# Altium footprint library PCB1.PcbLib: 34 footprints (part 1 of 3)
Each footprint in its own frame and in the unit in brackets; x right, y up, seen from the top. Pads: shape width x height; smd on the part's side, far side on the other; paste and mask are expansions set on the pad; w line width, h text height; cw(c..) or ccw(c..) is an arc to the next point about the centre after c.
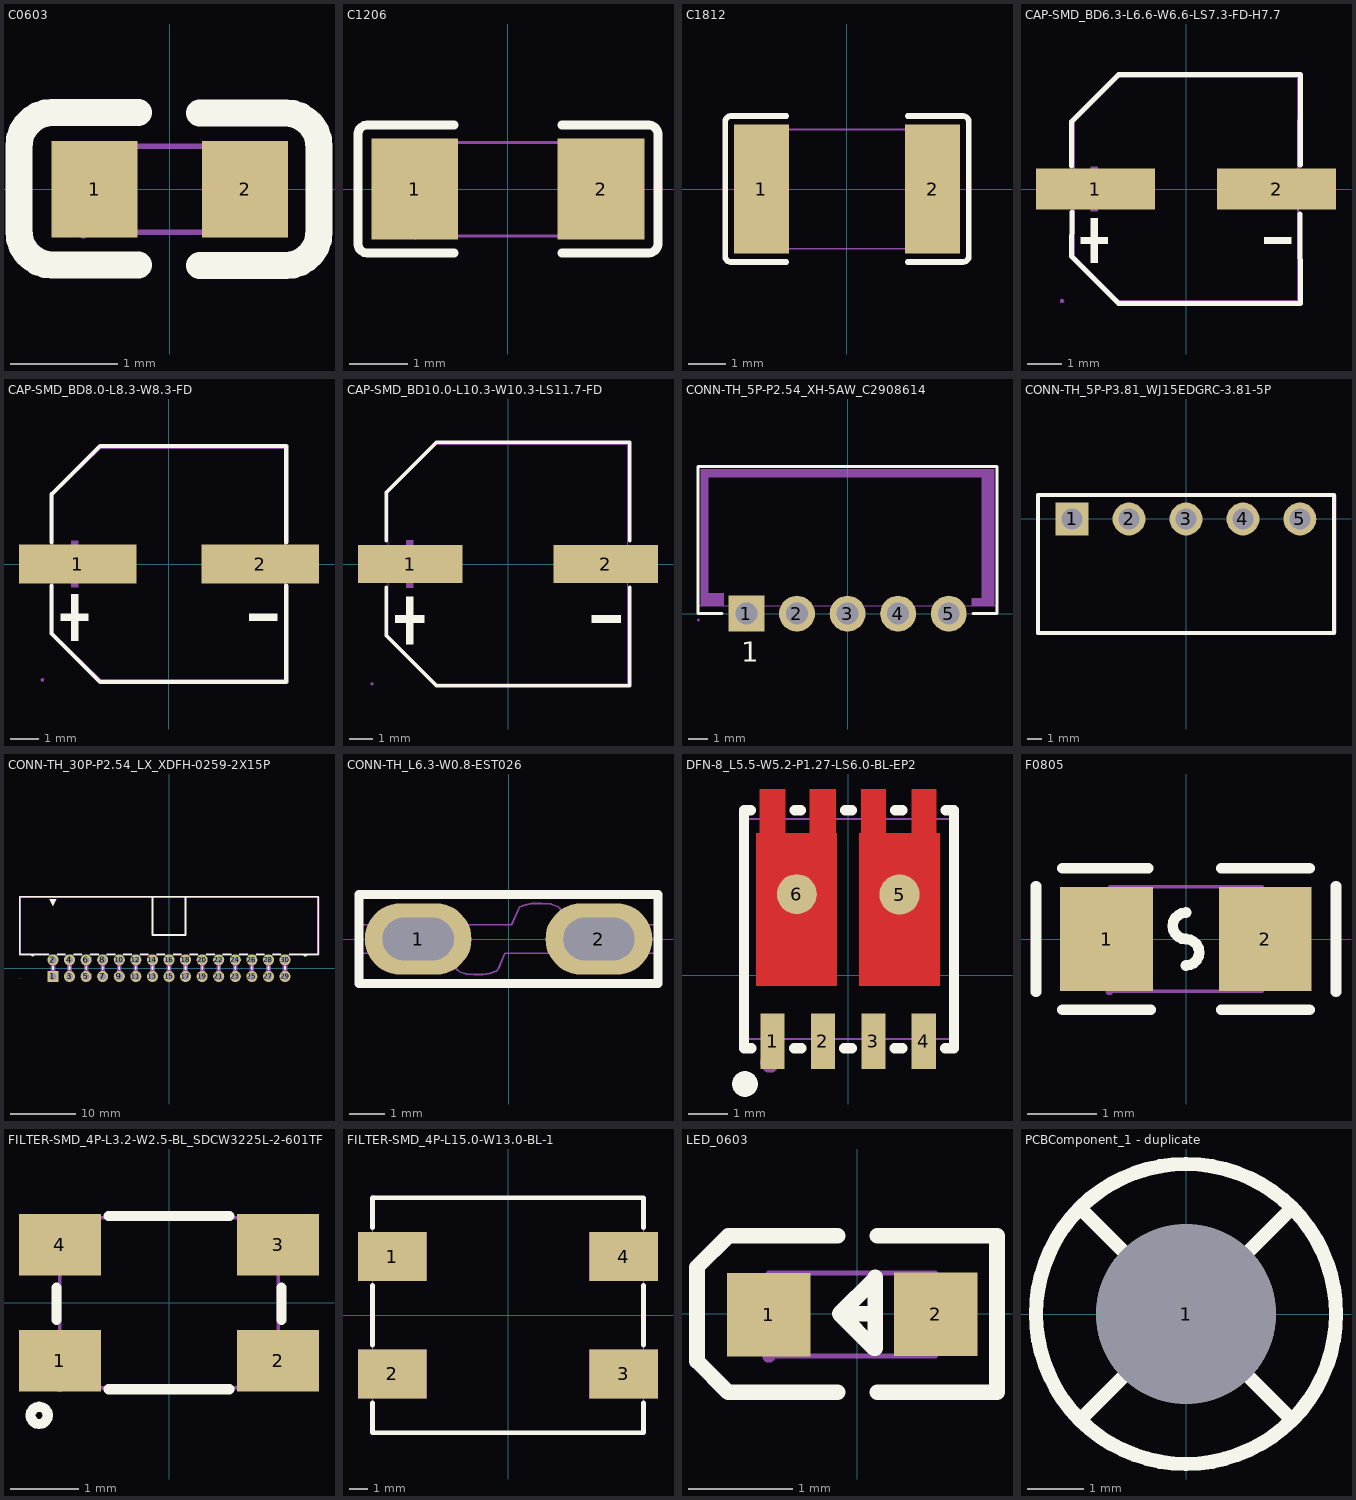
[diagram p0: the footprints below, top view; thin cyan lines are the x and y axes]

## C0603 [mil]
pads (2):
  rect 31.5x35.4 smd: 1(-27.6,0) 2(27.6,0)
Top Overlay:
  lines w10: -11.6,-27.7 -43.1,-27.7 -45.8,-27.4 -48.4,-26.5 -50.7,-25 -52.7,-23.1 -54.1,-20.8 -55,-18.2 -55.3,-15.5 -55.3,16 -55,18.7 -54.1,21.3 -52.7,23.6 -50.7,25.6 -48.4,27 -45.8,27.9 -43.1,28.2 -11.6,28.2 ; 11,-27.9 42.5,-27.9 45.2,-27.6 47.8,-26.7 50.1,-25.2 52.1,-23.3 53.5,-21 54.4,-18.4 54.7,-15.7 54.7,15.8 54.4,18.5 53.5,21.1 52.1,23.4 50.1,25.3 47.8,26.8 45.2,27.7 42.5,28 11,28
Mechanical 7:
  lines w2: -31.5,-15.7 -31.5,15.8 31.5,15.8 31.5,-15.7 -31.5,-15.7
Mechanical 8:
  region: -29.1,-15.7 -29.5,-17 -30.5,-17.8 -31.8,-18 -33,-17.5 -33.8,-16.4 -33.8,-15 -33,-13.9 -31.8,-13.4 -30.5,-13.6 -29.5,-14.4
Mechanical 9:
  region: -31.5,-15.7 -31.5,15.8 -19.7,15.8 -19.7,-15.7
  region: 31.5,-15.7 31.5,15.8 19.7,15.8 19.7,-15.7

## C1206 [mil]
pads (2):
  rect 58.5x68 smd paste-3937 mask+2: 1(-62.7,0) 2(62.7,0)
Top Overlay:
  lines w6: -36.4,-43 -94.9,-43 -96.8,-42.7 -98.4,-41.8 -99.8,-40.5 -100.6,-38.8 -100.9,-37 -100.9,37.1 -100.6,38.9 -99.8,40.6 -98.4,41.9 -96.8,42.8 -94.9,43.1 -36.4,43.1 ; 36.5,-43 95,-43 96.8,-42.7 98.5,-41.8 99.8,-40.5 100.7,-38.8 101,-37 101,37.1 100.7,38.9 99.8,40.6 98.5,41.9 96.8,42.8 95,43.1 36.5,43.1
Top Paste:
  region: -33.4,-30 -33.4,-15.5 -37.4,-11.5 -49.4,-11.5 -53.3,-7.6 -53.3,7.7 -49.4,11.6 -37.4,11.6 -33.4,15.5 -33.4,30.1 -37.4,34.1 -88,34.1 -91.9,30.1 -91.9,-30 -88,-34 -37.4,-34
  region: 33.5,-30 33.5,-15.5 37.4,-11.5 49.4,-11.5 53.4,-7.6 53.4,7.7 49.4,11.6 37.4,11.6 33.5,15.5 33.5,30.1 37.4,34.1 88,34.1 92,30.1 92,-30 88,-34 37.4,-34
Mechanical 7:
  lines w2: -63,-31.5 63,-31.5 63,31.5 -63,31.5 -63,-31.5
Mechanical 8:
  region: -60.6,-31.5 -61,-32.7 -62,-33.6 -63.3,-33.8 -64.5,-33.2 -65.2,-32.1 -65.2,-30.8 -64.5,-29.7 -63.3,-29.1 -62,-29.3 -61,-30.2
Mechanical 9:
  region: 63,-31.5 63,31.5 43.3,31.5 43.3,-31.5
  region: -63,-31.5 -63,31.5 -43.3,31.5 -43.3,-31.5

## C1812 [mil]
pads (2):
  rect 58.5x136.1 smd paste-3937 mask+2: 1(-90.2,0) 2(90.3,0)
Top Overlay:
  lines w6: -64,-77 -122.5,-77 -124.3,-76.7 -126,-75.9 -127.3,-74.5 -128.2,-72.9 -128.5,-71 -128.5,71.1 -128.2,72.9 -127.3,74.6 -126,75.9 -124.3,76.8 -122.5,77.1 -64,77.1 ; 64,-77 122.5,-77 124.4,-76.7 126,-75.9 127.4,-74.5 128.2,-72.9 128.5,-71 128.5,71.1 128.2,72.9 127.4,74.6 126,75.9 124.4,76.8 122.5,77.1 64,77.1
Top Paste:
  region: -61,-64.1 -61,-27 -64.9,-23.1 -76.9,-23.1 -80.9,-19.2 -80.9,19.2 -76.9,23.2 -64.9,23.2 -61,27.1 -61,64.1 -64.9,68.1 -115.5,68.1 -119.5,64.1 -119.5,-64.1 -115.5,-68 -64.9,-68
  region: 61,-64.1 61,-27 65,-23.1 77,-23.1 80.9,-19.2 80.9,19.2 77,23.2 65,23.2 61,27.1 61,64.1 65,68.1 115.6,68.1 119.5,64.1 119.5,-64.1 115.6,-68 65,-68
Mechanical 7:
  lines w2: -90.5,-63 90.6,-63 90.6,63 -90.5,63 -90.5,-63
Mechanical 8:
  region: -88.2,-63 -88.5,-64.2 -89.5,-65.1 -90.9,-65.3 -92.1,-64.8 -92.8,-63.6 -92.8,-62.3 -92.1,-61.2 -90.9,-60.6 -89.5,-60.8 -88.5,-61.7
Mechanical 9:
  region: 90.6,-63 90.6,63 70.9,63 70.9,-63
  region: -90.5,-63 -90.5,63 -70.8,63 -70.8,-63

## CAP-SMD_BD6.3-L6.6-W6.6-LS7.3-FD-H7.7 [mil]
pads (2):
  rect 137.8x47.2 smd: 1(-105.2,0) 2(105.1,0)
Top Overlay:
  region: -110.5,-33.7 -110.5,-85.7 -102.7,-85.7 -102.7,-33.7
  region: -122.2,-55.8 -122.2,-63.6 -91,-63.6 -91,-55.8
  region: 122.1,-55.8 122.1,-63.6 90.9,-63.6 90.9,-55.8
  lines w6: -133,27 -133,78 -78,133 132.9,133 132.6,27.9 ; -132.4,-27 -133,-78 -78.1,-132.9 132.9,-132.9 132.1,-29.1
Mechanical 6:
  region: -110.5,26 -110.5,-25.9 -102.7,-25.9 -102.7,26
  region: -122.2,3.9 -122.2,-3.9 -91,-3.9 -91,3.9
  region: 122.1,3.9 122.1,-3.9 90.9,-3.9 90.9,3.9
Mechanical 7:
  lines w2: -130,-77.9 -130,78 -78,130 129.9,130 129.9,-129.9 -78,-129.9 -130,-77.9
Mechanical 8:
  region: -141.4,-129.9 -141.8,-131.2 -142.8,-132 -144.1,-132.2 -145.4,-131.7 -146.1,-130.5 -146.1,-129.2 -145.4,-128.1 -144.1,-127.5 -142.8,-127.7 -141.8,-128.6
Mechanical 9:
  region: 39.3,13.8 143.6,13.8 143.6,-13.7 39.3,-13.7
  region: -143.8,13.8 -39.5,13.8 -39.5,-13.7 -143.8,-13.7

## CAP-SMD_BD8.0-L8.3-W8.3-FD [mil]
pads (2):
  rect 165.4x55.1 smd: 1(-128.6,0) 2(128.7,0)
Top Overlay:
  region: -137.9,-42.4 -137.9,-107.8 -128.1,-107.8 -128.1,-42.4
  region: -152.6,-70.2 -152.6,-80 -113.4,-80 -113.4,-70.2
  region: 152.6,-70.2 152.6,-80 113.4,-80 113.4,-70.2
  lines w6: -165.4,-30.8 -165.4,-98 -97,-166.4 165.4,-166.4 165.4,-30.8 ; -165.4,30.8 -165.4,98.1 -97,166.4 165.4,166.4 165.4,30.8
Mechanical 6:
  region: -137.9,32.7 -137.9,-32.6 -128.1,-32.6 -128.1,32.7
  region: -152.6,4.9 -152.6,-4.9 -113.4,-4.9 -113.4,4.9
  region: 152.6,4.9 152.6,-4.9 113.4,-4.9 113.4,4.9
Mechanical 7:
  lines w2: -163.4,-98 -163.4,98.1 -97,163.4 163.4,163.4 163.4,-163.4 -97,-163.4 -163.4,-98
Mechanical 8:
  region: -175.7,-163.4 -176.1,-164.6 -177.1,-165.5 -178.4,-165.7 -179.6,-165.1 -180.4,-164 -180.4,-162.7 -179.6,-161.6 -178.4,-161 -177.1,-161.2 -176.1,-162.1
Mechanical 9:
  region: -178.1,17.8 -62,17.8 -62,-17.7 -178.1,-17.7
  region: 62,17.8 178.2,17.8 178.2,-17.7 62,-17.7

## CAP-SMD_BD10.0-L10.3-W10.3-LS11.7-FD [mil]
pads (2):
  rect 177.2x65 smd: 1(-165.4,0) 2(165.3,0)
Top Overlay:
  region: 190.6,-87.1 190.6,-99.3 141.9,-99.3 141.9,-87.1
  region: -190.6,-87.1 -190.6,-99.3 -142,-99.3 -142,-87.1
  region: -172.4,-55 -172.4,-136.1 -160.2,-136.1 -160.2,-55
  lines w6: -205.8,-39.5 -205.8,-121.6 -121.7,-205.7 205.7,-205.7 205.7,-39.5 ; -205.8,39.6 -205.8,121.7 -121.7,205.8 205.7,205.8 205.7,39.6
Mechanical 6:
  region: 190.6,6.1 190.6,-6 141.9,-6 141.9,6.1
  region: -190.6,6.1 -190.6,-6 -142,-6 -142,6.1
  region: -172.4,40.6 -172.4,-40.5 -160.2,-40.5 -160.2,40.6
Mechanical 7:
  lines w2: -202.8,-121.6 -202.8,121.7 -121.7,202.8 202.7,202.8 202.7,-202.7 -121.7,-202.7 -202.8,-121.6
Mechanical 8:
  region: -228,-202.7 -228.3,-204 -229.4,-204.9 -230.7,-205 -231.9,-204.5 -232.6,-203.4 -232.6,-202 -231.9,-200.9 -230.7,-200.4 -229.4,-200.6 -228.3,-201.4
Mechanical 9:
  region: -230.3,17.8 -92.5,17.8 -92.5,-17.7 -230.3,-17.7
  region: 92.5,17.8 230.3,17.8 230.3,-17.7 92.5,-17.7

## CONN-TH_5P-P2.54_XH-5AW_C2908614 [mil]
pads (5):
  rect 70.9x70.9 hole 43.3 paste+0 mask+2: 1(-200,0)
  round 70.9 hole 43.3 paste+0 mask+2: 2(-100,0) 3(0,0) 4(100,0) 5(200,0)
Top Overlay:
  lines w5.9: -248,0 -295.3,0 -295.3,291.3 295.3,291.3 295.3,0 248,0
  text "1" at -210,-95 h39.4
Mechanical 6:
  region: -245,15 -245,40 -270,40 -275,40 -275,270 265,270 265,30 245,30 245,15 290,15 290,285 -290,285 -290,15
Mechanical 7:
  lines w2: -295.3,15.7 295.3,15.7 295.3,291.3 -295.3,291.3 -295.3,15.7
Mechanical 8:
  region: -292.9,-12.6 -293.3,-13.9 -294.3,-14.8 -295.6,-15 -296.8,-14.4 -297.6,-13.3 -297.6,-12 -296.8,-10.8 -295.6,-10.3 -294.3,-10.5 -293.3,-11.3
Mechanical 9:
  region: -212.6,12.6 -187.4,12.6 -187.4,-12.6 -212.6,-12.6
  region: -112.6,12.6 -87.4,12.6 -87.4,-12.6 -112.6,-12.6
  region: -12.6,12.6 12.6,12.6 12.6,-12.6 -12.6,-12.6
  region: 87.4,12.6 112.6,12.6 112.6,-12.6 87.4,-12.6
  region: 187.4,12.6 212.6,12.6 212.6,-12.6 187.4,-12.6
Mechanical 10:
  region: -187.4,-12.6 -212.6,-12.6 -212.6,26.8 -187.4,26.8
  region: -87.4,-12.6 -112.6,-12.6 -112.6,26.8 -87.4,26.8
  region: 12.6,-12.6 -12.6,-12.6 -12.6,26.8 12.6,26.8
  region: 112.6,-12.6 87.4,-12.6 87.4,26.8 112.6,26.8
  region: 212.6,-12.6 187.4,-12.6 187.4,26.8 212.6,26.8

## CONN-TH_5P-P3.81_WJ15EDGRC-3.81-5P [mil]
pads (5):
  rect 86.6x86.6 hole 55.1: 1(-300,0)
  round 86.6 hole 55.1: 2(-150,0) 3(0,0) 4(150,0) 5(300,0)
Top Overlay:
  lines w10: -390,-300.2 230,-300.2 390,-300.2 390,63 -390,63 -390,-297.3
Mechanical 6:
  region: -390,-295.2 230,-295.2 231.9,-295.6 233.6,-296.6 234.7,-298.3 235,-300.2 234.7,-302.1 233.6,-303.7 231.9,-304.8 230,-305.2 -390,-305.2 -391.9,-304.8 -393.5,-303.7 -394.6,-302.1 -395,-300.2 -394.6,-298.3 -393.5,-296.6 -391.9,-295.6
  region: 230,-295.2 385,-295.2 385,58 -385,58 -385,-297.3 -385.3,-299.2 -386.4,-300.8 -388.1,-301.9 -390,-302.3 -391.9,-301.9 -393.5,-300.8 -394.6,-299.2 -395,-297.3 -395,63 -394.6,64.9 -393.5,66.5 -391.9,67.6 -390,68 390,68 391.9,67.6 393.6,66.5 394.7,64.9 395,63 395,-300.2 394.7,-302.1 393.6,-303.7 391.9,-304.8 390,-305.2 230,-305.2 228.1,-304.8 226.5,-303.7 225.4,-302.1 225,-300.2 225.4,-298.3 226.5,-296.6 228.1,-295.6
Mechanical 7:
  lines w2: -392.3,-297.3 392.4,-297.3 392.4,63 -392.3,63 -392.3,-297.3
Mechanical 8:
  region: -389.9,-297.3 -390.3,-298.5 -391.3,-299.4 -392.6,-299.6 -393.8,-299.1 -394.6,-297.9 -394.6,-296.6 -393.8,-295.5 -392.6,-294.9 -391.3,-295.1 -390.3,-296
Mechanical 9:
  region: -315.7,15.7 -284.2,15.7 -284.2,-15.8 -315.7,-15.8
  region: -165.7,15.7 -134.2,15.7 -134.2,-15.8 -165.7,-15.8
  region: -15.7,15.7 15.8,15.7 15.8,-15.8 -15.7,-15.8
  region: 134.3,15.7 165.8,15.7 165.8,-15.8 134.3,-15.8
  region: 284.3,15.7 315.8,15.7 315.8,-15.8 284.3,-15.8

## CONN-TH_30P-P2.54_LX_XDFH-0259-2X15P [mil]
pads (30):
  rect 66.9x66.9 hole 43.3: 1(-700,-50)
  round 66.9 hole 43.3: 2(-700,50) 3(-600,-50) 4(-600,50) 5(-500,-50) 6(-500,50) 7(-400,-50) 8(-400,50) 9(-300,-50) 10(-300,50) 11(-200,-50) 12(-200,50) 13(-100,-50) 14(-100,50) 15(0,-50) 16(0,50) 17(100,-50) 18(100,50) 19(200,-50) 20(200,50) 21(300,-50) 22(300,50) 23(400,-50) 24(400,50) 25(500,-50) 26(500,50) 27(600,-50) 28(600,50) 29(700,-50) 30(700,50)
Top Overlay:
  region: -700,375 -720,415 -680,415
  lines w10: -900,430.3 -900,83.9 -725.7,83.9 ; -900,431.5 900,431.5 ; -830.4,83.9 -830,81.5 -828.9,79.3 -827.2,77.6 -825,76.5 -822.7,76.2 -820.3,76.6 -818.1,77.7 -816.4,79.4 -815.3,81.5 -815,83.9 ; -700,-7.4 -700,7.5 ; -674.2,83.9 -625.7,83.9 ; -600,-7.4 -600,7.5 ; -574.2,83.9 -525.7,83.9 ; -500,-7.4 -500,7.5 ; -474.2,83.9 -425.7,83.9 ; -400,-7.4 -400,7.5 ; -374.2,83.9 -325.7,83.9 ; -300,-7.4 -300,7.5 ; -274.2,83.9 -225.7,83.9 ; -200,-7.4 -200,7.5 ; -174.2,83.9 -125.7,83.9 ; -100,-7.4 -100,7.5 ; -74.2,83.9 -25.7,83.9 ; 0,-7.4 0,7.5 ; 25.8,83.9 74.3,83.9 ; 100,-7.4 100,7.5 ; 125.8,83.9 174.3,83.9 ; 200,-7.4 200,7.5 ; 225.8,83.9 274.3,83.9 ; 300,-7.4 300,7.5 ; 325.8,83.9 374.3,83.9 ; 400,-7.4 400,7.5 ; 425.8,83.9 474.3,83.9 ; 500,-7.4 500,7.5 ; 525.8,83.9 574.3,83.9 ; 600,-7.4 600,7.5 ; 625.8,83.9 674.3,83.9 ; 700,-7.4 700,7.5 ; 725.8,83.9 900,83.9 ; 814.7,82.7 815.1,80.3 816.2,78.2 817.9,76.5 820.1,75.4 822.5,75 824.9,75.4 827,76.5 828.7,78.2 829.8,80.4 830.2,82.8 ; 900,82.8 900,430.3 ; -100,200 100,200 100,430 -100,430 -100,200
Mechanical 6:
  region: -905,80 -905,430 -904.6,431.9 -903.5,433.6 -901.9,434.6 -900,435 900,435 902,434.6 903.6,433.6 904.7,431.9 905,430 905,80 904.7,78.1 903.6,76.5 902,75.4 900,75 898.1,75.4 896.5,76.5 895.4,78.1 895,80 895,425 -895,425 -895,80 -895.3,78.1 -896.4,76.5 -898,75.4 -900,75 -901.9,75.4 -903.5,76.5 -904.6,78.1
  region: -700,375 -720,415 -680,415
Mechanical 7:
  lines w2: -899.6,77.2 899.6,77.2 899.6,431.5 -899.6,431.5 -899.6,77.2
Mechanical 8:
  region: -897.2,-62.6 -897.6,-63.9 -898.6,-64.7 -899.9,-64.9 -901.1,-64.4 -901.8,-63.2 -901.8,-61.9 -901.1,-60.8 -899.9,-60.2 -898.6,-60.4 -897.6,-61.3
Mechanical 9:
  region: -712.6,-37.4 -687.4,-37.4 -687.4,-62.6 -712.6,-62.6
  region: -712.6,62.6 -687.4,62.6 -687.4,37.4 -712.6,37.4
  region: -612.6,-37.4 -587.4,-37.4 -587.4,-62.6 -612.6,-62.6
  region: -612.6,62.6 -587.4,62.6 -587.4,37.4 -612.6,37.4
  region: -512.6,-37.4 -487.4,-37.4 -487.4,-62.6 -512.6,-62.6
  region: -512.6,62.6 -487.4,62.6 -487.4,37.4 -512.6,37.4
  region: -412.6,-37.4 -387.4,-37.4 -387.4,-62.6 -412.6,-62.6
  region: -412.6,62.6 -387.4,62.6 -387.4,37.4 -412.6,37.4
  region: -312.6,-37.4 -287.4,-37.4 -287.4,-62.6 -312.6,-62.6
  region: -312.6,62.6 -287.4,62.6 -287.4,37.4 -312.6,37.4
  region: -212.6,-37.4 -187.4,-37.4 -187.4,-62.6 -212.6,-62.6
  region: -212.6,62.6 -187.4,62.6 -187.4,37.4 -212.6,37.4
  region: -112.6,-37.4 -87.4,-37.4 -87.4,-62.6 -112.6,-62.6
  region: -112.6,62.6 -87.4,62.6 -87.4,37.4 -112.6,37.4
  region: -12.6,-37.4 12.6,-37.4 12.6,-62.6 -12.6,-62.6
  region: -12.6,62.6 12.6,62.6 12.6,37.4 -12.6,37.4
  region: 87.4,-37.4 112.6,-37.4 112.6,-62.6 87.4,-62.6
  region: 87.4,62.6 112.6,62.6 112.6,37.4 87.4,37.4
  region: 187.4,-37.4 212.6,-37.4 212.6,-62.6 187.4,-62.6
  region: 187.4,62.6 212.6,62.6 212.6,37.4 187.4,37.4
  region: 287.4,-37.4 312.6,-37.4 312.6,-62.6 287.4,-62.6
  region: 287.4,62.6 312.6,62.6 312.6,37.4 287.4,37.4
  region: 387.4,-37.4 412.6,-37.4 412.6,-62.6 387.4,-62.6
  region: 387.4,62.6 412.6,62.6 412.6,37.4 387.4,37.4
  region: 487.4,-37.4 512.6,-37.4 512.6,-62.6 487.4,-62.6
  region: 487.4,62.6 512.6,62.6 512.6,37.4 487.4,37.4
  region: 587.4,-37.4 612.6,-37.4 612.6,-62.6 587.4,-62.6
  region: 587.4,62.6 612.6,62.6 612.6,37.4 587.4,37.4
  region: 687.4,-37.4 712.6,-37.4 712.6,-62.6 687.4,-62.6
  region: 687.4,62.6 712.6,62.6 712.6,37.4 687.4,37.4
Mechanical 10:
  region: 487.4,78.8 512.6,78.8 512.6,-40.2 487.4,-40.2
  region: 587.4,78.8 612.6,78.8 612.6,-40.2 587.4,-40.2
  region: 687.4,78.8 712.6,78.8 712.6,-40.2 687.4,-40.2
  region: -112.6,78.8 -87.4,78.8 -87.4,-40.2 -112.6,-40.2
  region: -12.6,78.8 12.6,78.8 12.6,-40.2 -12.6,-40.2
  region: 87.4,78.8 112.6,78.8 112.6,-40.2 87.4,-40.2
  region: 187.4,78.8 212.6,78.8 212.6,-40.2 187.4,-40.2
  region: 287.4,78.8 312.6,78.8 312.6,-40.2 287.4,-40.2
  region: 387.4,78.8 412.6,78.8 412.6,-40.2 387.4,-40.2
  region: -212.6,78.8 -187.4,78.8 -187.4,-40.2 -212.6,-40.2
  region: -312.6,78.8 -287.4,78.8 -287.4,-40.2 -312.6,-40.2
  region: -412.6,78.8 -387.4,78.8 -387.4,-40.2 -412.6,-40.2
  region: -512.6,78.8 -487.4,78.8 -487.4,-40.2 -512.6,-40.2
  region: -612.6,78.8 -587.4,78.8 -587.4,-40.2 -612.6,-40.2
  region: -712.6,78.8 -687.4,78.8 -687.4,-40.2 -712.6,-40.2

## CONN-TH_L6.3-W0.8-EST026 [mil]
pads (2):
  oval 118.1x78.7 hole 47.2 slot 78.7 at 0 deg: 1(-100,0) 2(100,0)
Top Overlay:
  lines w10: -165.3,-49.2 165.4,-49.2 165.4,49.2 -165.3,49.2 -165.3,-49.2
Mechanical 7:
  lines w2: -164.4,-15.8 -65.4,-15.8 -65,-16.2 -57.5,-33.5 -54.3,-36.2 -50.8,-37.4 -46.5,-38.6 -38.6,-39.4 -27.9,-39.4 -21.3,-38.2 -13.4,-35.5 -11,-32.7 -4.3,-16.2 -3.5,-15.8 164.4,-15.8 164.4,15.7 65,15.7 57.1,33.4 55.1,35.4 53.5,36.2 46.9,38.6 37.4,39.3 25.2,39.3 16.5,37 11.8,35 3.2,15.7 -164.4,15.7 -164.4,-15.8
Mechanical 8:
  region: -162,-39.4 -162.4,-40.7 -163.4,-41.5 -164.7,-41.7 -165.9,-41.2 -166.6,-40.1 -166.6,-38.7 -165.9,-37.6 -164.7,-37.1 -163.4,-37.2 -162.4,-38.1
Mechanical 9:
  region: -123.6,-15.8 -123.6,15.7 -76.4,15.7 -76.4,-15.8
  region: 76.4,-15.8 76.4,15.7 123.6,15.7 123.6,-15.8

## DFN-8_L5.5-W5.2-P1.27-LS6.0-BL-EP2 [mil]
pads (6):
  rect 24x55 smd: 1(-75,-65.3) 2(-25,-65.3) 3(25,-65.3) 4(75,-65.3)
  round 39.8 smd: 5(51,80.2)
  round 39.7 smd: 6(-51,80.6)
Top Layer:
  region: -91.1,-10.1 -91.1,140.9 -87.6,140.9 -87.6,184.9 -62.5,184.9 -62.5,140.9 -37.9,140.9 -37.9,184.9 -12.3,184.9 -12.3,140.9 -11.3,140.9 -11.3,-10.1
  region: 11.2,-10.1 11.2,140.9 12.8,140.9 12.8,184.9 37.3,184.9 37.3,140.9 62.9,140.9 62.9,184.9 87.5,184.9 87.5,140.9 91.1,140.9 91.1,-10.1
Top Overlay:
  lines w10: -96.7,163.8 -103.5,163.8 -103.5,-72.4 -96.1,-72.4 ; -53.9,-72.4 -46.1,-72.4 ; -53.4,163.8 -47,163.8 ; -3.9,-72.4 3.9,-72.4 ; -3.2,163.8 3.7,163.8 ; 46.1,-72.4 53.9,-72.4 ; 46.4,163.8 53.8,163.8 ; 96.1,-72.4 103.5,-72.4 ; 96.6,163.8 105,163.8 105,-72.4
  lines w15.7: -97.5,-107.9 -97.9,-109.8 -99,-111.3 -100.6,-112.4 -102.5,-112.8 -104.3,-112.4 -105.9,-111.3 -107,-109.7 -107.3,-107.9 -107,-106 -105.9,-104.4 -104.3,-103.3 -102.5,-103 -100.6,-103.3 -99,-104.4 -97.9,-105.9 -97.5,-107.8
Mechanical 6:
  lines w10: -82.6,-86.6 -82.2,-84.6 -81.1,-83 -79.5,-81.9 -77.6,-81.6 -75.7,-81.9 -74.1,-83 -73,-84.6 -72.6,-86.6 -73,-88.5 -74.1,-90.1 -75.7,-91.2 -77.6,-91.6 -79.5,-91.2 -81.1,-90.1 -82.2,-88.5 -82.6,-86.6
Mechanical 7:
  lines w2: -102.4,-63.3 102.3,-63.3 102.3,155.2 -102.4,155.2 -102.4,-63.3
Mechanical 8:
  region: -100,-73.2 -100.4,-74.5 -101.4,-75.3 -102.7,-75.5 -103.9,-75 -104.7,-73.8 -104.7,-72.5 -103.9,-71.4 -102.7,-70.8 -101.4,-71 -100.4,-71.9
Mechanical 9:
  region: 67.1,-51.5 82.8,-51.5 82.8,-73.2 67.1,-73.2
  region: 17.1,-51.5 32.8,-51.5 32.8,-73.2 17.1,-73.2
  region: -32.9,-51.5 -17.2,-51.5 -17.2,-73.2 -32.9,-73.2
  region: -82.9,-51.5 -67.2,-51.5 -67.2,-73.2 -82.9,-73.2
  region: -85.7,-10.1 -85.7,140.9 -83.1,140.9 -83.1,165 -67.4,165 -67.4,140.9 -33.1,140.9 -33.1,165 -17.4,165 -17.4,140.9 -11.8,140.9 -11.8,-10.1
  region: 11.8,-10.1 11.8,140.9 16.9,140.9 16.9,165 32.6,165 32.6,140.9 66.9,140.9 66.9,165 82.6,165 82.6,140.9 85.6,140.9 85.6,-10.1

## F0805 [mil]
pads (2):
  rect 52.6x59.1 smd paste-3937 mask+2: 1(-45,0) 2(44.9,0)
Top Overlay:
  lines w6: -85,-30 -85,30 ; -70,-40 -20,-40 ; -70,40 -21.5,40 ; 0,-15 2.3,-14.7 4.4,-13.6 6,-11.9 7.1,-9.9 7.5,-7.5 7.1,-5.2 6,-3.1 4.4,-1.5 2.3,-0.4 0,0 -2.4,0.3 -4.4,1.4 -6.1,3.1 -7.2,5.1 -7.5,7.5 -7.2,9.8 -6.1,11.9 -4.4,13.5 -2.4,14.6 0,15 ; 20,-40 70,-40 ; 20,40 70,40 ; 85,-30 85,30
Top Paste:
  region: 18.7,-24.4 18.7,-7.9 36.2,-7.9 36.2,9.8 18.9,9.8 18.7,25.9 20.6,27.9 65.9,27.9 67.9,25.9 67.9,-24.4 65.9,-26.4 20.6,-26.4
  region: -66,-24.4 -66,25.9 -64,27.9 -18.7,27.9 -16.8,25.9 -16.6,9.8 -34.3,9.8 -34.3,-7.9 -17,-7.9 -16.8,-24.4 -18.7,-26.4 -64,-26.4
Mechanical 7:
  lines w2: -43.3,-29.6 43.3,-29.6 43.3,29.5 -43.3,29.5 -43.3,-29.6
Mechanical 8:
  region: -41,-29.6 -41.4,-30.8 -42.4,-31.7 -43.7,-31.9 -44.9,-31.3 -45.6,-30.2 -45.6,-28.9 -44.9,-27.8 -43.7,-27.2 -42.4,-27.4 -41.4,-28.3
Mechanical 9:
  region: 43.3,-29.6 35.4,-29.6 35.4,29.5 43.3,29.5
  region: -43.3,29.5 -35.5,29.5 -35.5,-29.6 -43.3,-29.6

## FILTER-SMD_4P-L3.2-W2.5-BL_SDCW3225L-2-601TF [mil]
pads (4):
  rect 47.2x35.4 smd: 1(-63,-33.5) 2(63,-33.5) 3(63,33.4) 4(-63,33.4)
Top Overlay:
  lines w5.9: -65,-10 -65,8.7 ; -35,-50 35,-50 ; -35,50 35,50 ; 65,-10 65,8.7 ; -80,-65 -79.6,-63.1 -78.5,-61.5 -76.9,-60.4 -75,-60 -73.1,-60.4 -71.4,-61.5 -70.3,-63.1 -70,-65 -70.3,-66.9 -71.4,-68.6 -73.1,-69.7 -75,-70 -76.9,-69.7 -78.5,-68.6 -79.6,-66.9 -80,-65
Mechanical 7:
  lines w2: -63,-49.2 63,-49.2 63,49.2 -63,49.2 -63,-49.2
Mechanical 8:
  region: -60.6,-49.2 -61,-50.5 -62,-51.4 -63.3,-51.6 -64.5,-51 -65.2,-49.9 -65.2,-48.6 -64.5,-47.5 -63.3,-46.9 -62,-47.1 -61,-48
Mechanical 9:
  region: 39.4,17.7 39.4,49.2 63,49.2 63,17.7
  region: 39.4,-49.2 39.4,-17.7 63,-17.7 63,-49.2
  region: -63,-49.2 -63,-17.7 -39.3,-17.7 -39.3,-49.2
  region: -63,17.7 -63,49.2 -39.3,49.2 -39.3,17.7

## FILTER-SMD_4P-L15.0-W13.0-BL-1 [mil]
pads (4):
  rect 149.6x106.3 smd: 1(-252,128) 2(-252,-127.9) 3(251.9,-127.9) 4(251.9,128)
Top Overlay:
  lines w10: -295.3,-190.2 -295.3,-255.9 295.2,-255.9 295.2,-190.2 ; -295.3,-65.7 -295.3,65.7 ; -295.3,190.2 -295.3,255.9 295.2,255.9 295.2,190.2 ; 295.2,-65.7 295.2,65.7
Mechanical 7:
  lines w2: -295.1,-255 295.5,-255 295.5,256.8 -295.1,256.8 -295.1,-255
Mechanical 8:
  region: -290.3,256.7 -290.7,254.9 -291.7,253.4 -293.2,252.4 -295,252 -296.9,252.4 -298.4,253.4 -299.4,254.9 -299.8,256.7 -299.4,258.5 -298.4,260.1 -296.9,261.1 -295,261.4 -293.2,261.1 -291.7,260.1 -290.7,258.5
Mechanical 9:
  region: -326.8,-74.8 -177.2,-74.8 -177.2,-181.1 -326.8,-181.1
  region: 177.1,-74.8 326.7,-74.8 326.7,-181.1 177.1,-181.1
  region: 177.1,181.1 326.7,181.1 326.7,74.8 177.1,74.8
  region: -326.8,181.1 -177.2,181.1 -177.2,74.8 -326.8,74.8

## LED_0603 [mil]
pads (2):
  rect 31.5x31.5 smd paste+0 mask+2: 1(-33.5,-0.4) 2(29.5,-0.2)
Top Overlay:
  lines w5.9: -7.5,-29.7 -48.8,-29.7 -60.6,-17.9 -60.6,-13.9 -60.6,13.6 -60.6,17.6 -48.8,29.4 -7.5,29.4 ; 6.7,0 -6.7,0 ; 7.5,-29.6 52.7,-29.6 ; 7.5,29.5 52.7,29.5 52.7,-28.8 ; -6.7,0 6.7,13.3 6.7,13.7 6.7,-13 6.3,-13 -6.7,0
Mechanical 6:
  region: -44.1,2.1 -22.9,2.1 -22.9,-3 -44.1,-3
  region: 26.9,-10.8 26.9,10.4 32,10.4 32,-10.8
  region: 18.8,2.4 40.1,2.4 40.1,-2.7 18.8,-2.7
Mechanical 7:
  lines w2: -33.5,-16 29.5,-16 29.5,15.4 -33.5,15.4 -33.5,-16
Mechanical 8:
  region: -31.1,-16.2 -31.5,-17.5 -32.5,-18.4 -33.8,-18.6 -35.1,-18 -35.8,-16.9 -35.8,-15.5 -35.1,-14.4 -33.8,-13.8 -32.5,-14 -31.5,-14.9
Mechanical 9:
  region: -33.5,-16.2 -33.5,15.3 -21.7,15.3 -21.7,-16.2
  region: 17.7,-15.9 17.7,15.6 29.5,15.6 29.5,-15.9

## PCBComponent_1 - duplicate [mil]
pads (1):
  round 126 hole 126 paste+0 mask+4: 1(0,0)
Top Overlay:
  lines w10: -72.5,-72.5 72.5,72.5 ; -72.5,72.5 72.5,-72.5 ; -105,0 -104.6,9.2 -103.4,18.3 -101.4,27.2 -98.6,35.9 -95.1,44.4 -90.9,52.5 -86,60.3 -80.4,67.5 -74.2,74.3 -67.5,80.5 -60.2,86 -52.5,91 -44.3,95.2 -35.9,98.7 -27.1,101.5 -18.2,103.4 -9.1,104.6 0,105 9.2,104.6 18.3,103.4 27.2,101.5 35.9,98.7 44.4,95.2 52.5,91 60.3,86 67.5,80.5 74.3,74.3 80.5,67.5 86,60.3 91,52.5 95.2,44.4 98.7,35.9 101.5,27.2 103.4,18.3 104.6,9.2 105,0 104.6,-9.1 103.4,-18.2 101.5,-27.1 98.7,-35.9 95.2,-44.3 91,-52.5 86,-60.2 80.5,-67.5 74.3,-74.2 67.5,-80.4 60.3,-86 52.5,-90.9 44.4,-95.1 35.9,-98.6 27.2,-101.4 18.3,-103.4 9.2,-104.6 0,-105 -9.1,-104.6 -18.2,-103.4 -27.1,-101.4 -35.9,-98.6 -44.3,-95.1 -52.5,-90.9 -60.2,-86 -67.5,-80.4 -74.2,-74.2 -80.4,-67.5 -86,-60.2 -90.9,-52.5 -95.1,-44.3 -98.6,-35.9 -101.4,-27.1 -103.4,-18.2 -104.6,-9.1 -105,0